# Altium footprint library custom-case.PcbLib: 483 footprints (part 28 of 31)
Each footprint in its own frame and in the unit in brackets; x right, y up, seen from the top. Pads: shape width x height; smd on the part's side, far side on the other; paste and mask are expansions set on the pad; w line width, h text height; cw(c..) or ccw(c..) is an arc to the next point about the centre after c.
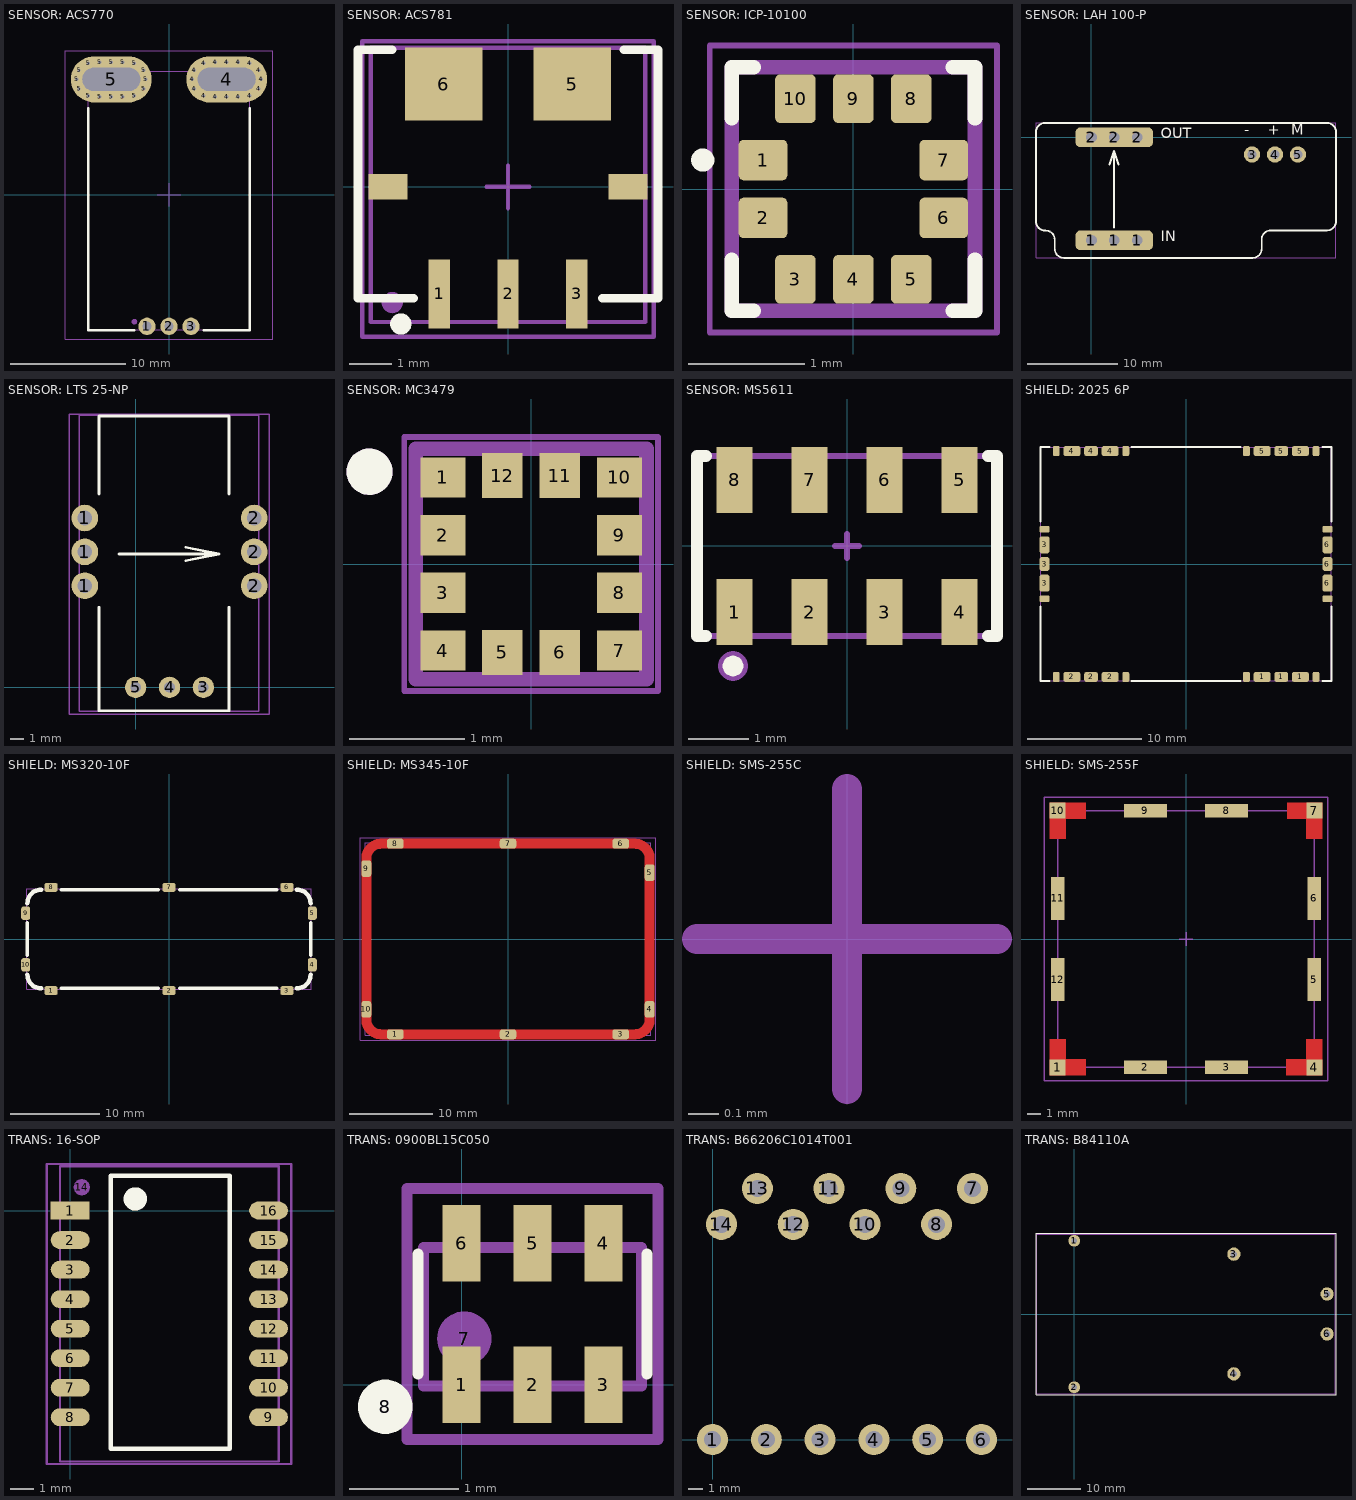
[diagram p27: the footprints below, top view; thin cyan lines are the x and y axes]

## SENSOR: ACS770 [mm]
pads (38):
  round 1.5 hole 0.8: 1(-1.91,-11.4) 2(0,-11.4) 3(1.91,-11.4)
  round 0.5 on Mech1: 4(-3,-11)
  round 0.7 hole 0.3: 4(2,10) 4(2.2,9.2) 4(2.2,10.8) 4(3,8.6) 4(3,11.4) 4(4,8.5) 4(4,11.5) 4(5,8.5) 4(5,11.5) 4(6,8.5) 4(6,11.5) 4(7,8.6) 4(7,11.4) 4(7.8,9.2) 4(7.8,10.8) 4(8,10) 5(-8,10) 5(-7.8,9.2) 5(-7.8,10.8) 5(-7,8.6) 5(-7,11.4) 5(-6,8.5) 5(-6,11.5) 5(-5,8.5) 5(-5,11.5) 5(-4,8.5) 5(-4,11.5) 5(-3,8.6) 5(-3,11.4) 5(-2.2,9.2) 5(-2.2,10.8) 5(-2,10)
  oval 7x4 hole 2 slot 5 at 0 deg: 4(5,10) 5(-5,10)
Top Overlay:
  lines w0.2: -7,7.5 -7,-11.75 -3,-11.75 ; 3,-11.75 7,-11.75 7,7.5
Top Assy:
  lines w0.1: -7,-11.705 -7,10.705 7,10.705 7,-11.705 -7,-11.705
Size Area:
  lines w0.1: -1,0 1,0 ; 0,-1 0,1 ; -9,-12.5 -9,12.5 9,12.5 9,-12.5 ; -9,-12.5 9,-12.5 ; -9,-12.5 9,-12.5
3D body "User Library-ACS758xCB-PFF.STEP": height 7.5, standoff -2.98, extent -7,-11.705 7,10.705

## SENSOR: ACS781 [mm]
pads (9):
  rect 0.5x1.6 smd: 1(-1.6,-2.5) 2(0,-2.5) 3(1.6,-2.5)
  rect 1.8x1.7 smd: 5(1.5,2.4) 6(-1.5,2.4)
  rect 0.9x0.6 smd: ""(-2.8,0) ""(2.8,0)
  round 0.5 on Mech1: ""(-2.7,-2.7)
  round 0.5 on Top Overlay: ""(-2.5,-3.2)
Top Overlay:
  lines w0.2: -2.7,3.2 -3.5,3.2 -3.5,-2.6 -2.2,-2.6 ; 2.2,-2.6 3.5,-2.6 3.5,3.2 2.7,3.2
Top Assy:
  lines w0.1: -3.2,-3.154 3.2,-3.154 3.2,3.246 -3.2,3.246 -3.2,-3.154
Size Area:
  lines w0.1: -0.5,0 0.5,0 ; 0,-0.5 0,0.5 ; -3.4,-3.5 -3.4,3.4 3.4,3.4 3.4,-3.5 -3.4,-3.5
3D body "User Library-7-Pin PSOF Package.STEP": height 1.46, standoff -0.02, extent -3.2,-3.154 3.2,3.246

## SENSOR: ICP-10100 [mm] "2.0 x 2.0 x 0.72 mm"
pads (10):
  rrect25% 0.42x0.35 smd: 1(-0.78,0.25) 2(-0.78,-0.25) 6(0.78,-0.25) 7(0.78,0.25)
  rrect25% 0.35x0.42 smd: 3(-0.5,-0.78) 4(0,-0.78) 5(0.5,-0.78) 8(0.5,0.78) 9(0,0.78) 10(-0.5,0.78)
Top Overlay:
  circle w0.1: c-1.3,0.25 r0.05
  lines w0.127: -1.05,-0.61 -1.05,-1.05 -0.86,-1.05 ; -1.05,0.61 -1.05,1.05 -0.86,1.05 ; 0.86,-1.05 1.05,-1.05 1.05,-0.61 ; 0.86,1.05 1.05,1.05 1.05,0.61
3D model:
  circle w0.1: c-0.75,0.25 r0.05
  lines w0.127: -1.05,-1.05 -1.05,1.05 1.05,1.05 1.05,-1.05 -1.05,-1.05
Size Area:
  lines w0.05: -1.24,-1.24 -1.24,1.24 1.24,1.24 1.24,-1.24 -1.24,-1.24
3D body "ICP-10100--3DModel-STEP-56544.STEP": height 0.8, standoff 0, extent -1,-1 1,1

## SENSOR: LAH 100-P [mm]
pads (9):
  rrect50% 3.5x2.2 hole 1.2 square: 1(0,-11.4) 1(2.54,-11.4) 1(5.08,-11.4) 2(0,0) 2(2.54,0) 2(5.08,0)
  round 1.8 hole 1: 3(17.78,-1.905) 4(20.32,-1.905) 5(22.86,-1.905)
Top Overlay:
  lines w0.2: -6.125,0.595 cw(c-5.125,0.595) -5.125,1.595 26.075,1.595 cw(c26.075,0.595) 27.075,0.595 27.075,-9.302 ; -6.125,0.6 -6.125,-9.325 ccw(c-5.125,-9.325) -5.125,-10.325 -5.05,-10.325 cw(c-5.05,-11.325) -4.05,-11.325 -4.05,-12.345 ccw(c-3.05,-12.345) -3.05,-13.345 17.85,-13.345 ccw(c17.85,-12.345) 18.85,-12.345 18.85,-11.3 cw(c19.85,-11.3) 19.85,-10.3 26.075,-10.3 ccw(c26.075,-9.3) 27.075,-9.3 ; 2,-3 2.5,-1.5 ; 2.5,-10 2.5,-1.5 ; 3,-3 2.5,-1.5
  text "IN" at 7.7,-11.9 h2
  text "OUT" at 7.7,-0.5 h2
  text "-" at 16.9,-0.1 h2
  text "+" at 19.5,-0.1 h2
  text "M" at 22.1,-0.1 h2
Top Assy:
  lines w0.1: -6.125,-13.345 -6.125,1.595 27.075,1.595 27.075,-13.345 -6.125,-13.345
Size Area:
  lines w0.1: -6.125,-13.345 -6.125,1.595 27.075,1.595 27.075,-13.345 -6.125,-13.345
3D body "TransCurrent v4.step": height 20.15, standoff -4.45, extent -6.125,-13.345 27.075,1.595

## SENSOR: LTS 25-NP [mm]
pads (9):
  round 2 hole 1.1: 1(-3.81,7.62) 1(-3.81,10.16) 1(-3.81,12.7) 2(8.89,7.62) 2(8.89,10.16) 2(8.89,12.7)
  round 1.6 hole 0.8: 3(5.08,0) 4(2.54,0) 5(0,0)
Top Overlay:
  lines w0.2: -2.75,6 -2.75,-1.75 7,-1.75 7,6 ; -2.75,14.5 -2.75,20.35 7,20.35 7,14.5 ; -1.25,10 6.25,10 ; 3.75,9.5 6.25,10 ; 3.75,10.5 6.25,10
Top Assy:
  lines w0.1: -4.25,-1.8 -4.25,20.4 9.25,20.4 9.25,-1.8 -4.25,-1.8
Size Area:
  lines w0.1: -5,-2 -5,20.5 10,20.5 10,-2 -5,-2
3D body "User Library-LTS6_NP.STEP": height 24, standoff -3.5, extent -4.25,-1.8 9.25,20.4

## SENSOR: MC3479 [mm] "2.0 x 2.0 x 0.94 mm"
pads (12):
  rect 0.39x0.35 smd: 1(-0.765,0.75) 2(-0.765,0.25) 3(-0.765,-0.25) 4(-0.765,-0.75) 7(0.765,-0.75) 8(0.765,-0.25) 9(0.765,0.25) 10(0.765,0.75)
  rect 0.35x0.39 smd: 5(-0.25,-0.765) 6(0.25,-0.765) 11(0.25,0.765) 12(-0.25,0.765)
Top Overlay:
  circle w0.2: c-1.4,0.8 r0.1
3D model:
  circle w0.2: c-1.4,0.8 r0.1
  lines w0.127: -1,-1 1,-1 1,1 -1,1 -1,-1
Size Area:
  lines w0.05: -1.1,-1.1 1.1,-1.1 1.1,1.1 -1.1,1.1 -1.1,-1.1
3D body "LGA-12 2x2mm.step": height 0.94, standoff 0, extent -1,-1 1,1

## SENSOR: MS5611 [mm] "5.0 x 3.0 x 1.0 mm"
pads (10):
  rect 0.6x1.1 smd: 1(-1.875,-1.1) 2(-0.625,-1.1) 3(0.625,-1.1) 4(1.875,-1.1) 5(1.875,1.1) 6(0.625,1.1) 7(-0.625,1.1) 8(-1.875,1.1)
  round 0.5 on Mech1: ""(-1.9,-2)
  round 0.35 on Top Overlay: ""(-1.9,-2)
Top Overlay:
  lines w0.2: -2.35,-1.5 -2.5,-1.5 -2.5,0 -2.5,1.5 -2.35,1.5 ; 2.35,-1.5 2.5,-1.5 2.5,0 2.5,1.5 2.35,1.5
Top Assy:
  lines w0.1: -2.5,-1.5 2.5,-1.5 2.5,1.5 -2.5,1.5 -2.5,-1.5
Size Area:
  lines w0.1: -0.2,0 0.2,0 ; 0,-0.2 0,0.2 ; -2.5,-1.5 -2.5,1.5 2.5,1.5 2.5,-1.5 -2.5,-1.5
3D body "MS5611-01BA03.stp": height 1.08, standoff 0.06, extent -2.5,-1.5 2.5,1.5

## SHIELD: 2025 6P [mm] "Shield"
pads (30):
  rrect50% 0.6x0.9 smd: 1(5.3,-9.9) 1(11.4,-9.9) 2(-11.375,-9.9) 2(-5.275,-9.9) 4(-11.375,9.9) 4(-5.275,9.9) 5(5.3,9.9) 5(11.4,9.9)
  rrect50% 1.5x0.9 smd: 1(6.675,-9.9) 1(10.025,-9.9) 2(-10,-9.9) 2(-6.65,-9.9) 4(-10,9.9) 4(-6.65,9.9) 5(6.675,9.9) 5(10.025,9.9)
  rrect50% 1.2x0.9 smd: 1(8.35,-9.9) 2(-8.325,-9.9) 4(-8.325,9.9) 5(8.35,9.9)
  rrect50% 0.9x0.6 smd: 3(-12.4,-3.05) 3(-12.4,3.05) 6(12.4,-3.05) 6(12.4,3.05)
  rrect50% 0.9x1.5 smd: 3(-12.4,-1.675) 3(-12.4,1.675) 6(12.4,-1.675) 6(12.4,1.675)
  rrect50% 0.9x1.2 smd: 3(-12.4,0) 6(12.4,0)
Top Overlay:
  lines w0.2: -12.75,-3.75 -12.75,-10.25 -12,-10.25 ; -12.75,3.75 -12.75,10.25 -12,10.25 ; -4.75,-10.25 4.75,-10.25 ; -4.75,10.25 4.75,10.25 ; 12,-10.25 12.75,-10.25 12.75,-3.75 ; 12,10.25 12.75,10.25 12.75,3.75
Top Assy:
  lines w0.1: -12.75,-10.25 12.75,-10.25 12.75,10.25 -12.75,10.25 -12.75,-10.25
3D body "Shield_2025_01.STEP": height -1.65, standoff -4.8, extent -12.827,-10.327 12.828,10.328

## SHIELD: MS320-10F [mm] "Shield"
pads (10):
  rrect50% 1.5x1 smd mask+0.102: 1(-13.25,-5.8) 2(0,-5.8) 3(13.25,-5.8) 6(13.25,5.8) 7(0,5.8) 8(-13.25,5.8)
  rrect50% 1x1.5 smd mask+0.102: 4(16.1,-2.9) 5(16.1,2.9) 9(-16.1,2.9) 10(-16.1,-2.9)
Top Layer:
  lines w0.3: -15.876,-4.269 ccw(c-14.35,-4) -14.619,-5.526 ; -15.876,4.269 cw(c-14.35,4) -14.619,5.526 ; 14.619,-5.526 ccw(c14.35,-4) 15.876,-4.269 ; 14.619,5.526 cw(c14.35,4) 15.876,4.269
Top Overlay:
  lines w0.4: -15.9,-1.8 -15.9,1.8 ; -12.1,-5.55 -1.2,-5.55 ; -12.1,5.55 -1.2,5.55 ; 1.2,-5.55 12.1,-5.55 ; 1.2,5.55 12.1,5.55 ; 15.9,-1.8 15.9,1.8
  lines w0.5: -15.9,-4 ccw(c-14.35,-4) -14.35,-5.55 ; -15.9,4 cw(c-14.35,4) -14.35,5.55 ; 14.35,-5.55 ccw(c14.35,-4) 15.9,-4 ; 14.35,5.55 cw(c14.35,4) 15.9,4
Top Assy:
  lines w0.1: -16,-5.65 -16,5.65 16,5.65 16,-5.65 -16,-5.65
Size Area:
  lines w0.1: -16,-5.65 16,-5.65 16,5.65 -16,5.65 -16,-5.65
3D body "MS320-10F.STEP": height 2.06, standoff 0.06, extent -16,-5.65 16,5.65

## SHIELD: MS345-10F [mm] "Shield"
pads (10):
  rrect50% 2x1.2 smd mask+0.102: 1(-13.6,-11.5) 2(0,-11.5) 3(13.6,-11.5) 6(13.6,11.5) 7(0,11.5) 8(-13.6,11.5)
  rrect50% 1.2x2 smd mask+0.102: 4(17.1,-8.5) 5(17.1,8) 9(-17.1,8.5) 10(-17.1,-8.5)
Top Layer:
  lines w1.2: -17.1,-9.7 ccw(c-15.3,-9.7) -15.3,-11.5 15.3,-11.5 ccw(c15.3,-9.7) 17.1,-9.7 17.1,9.7 ccw(c15.3,9.7) 15.3,11.5 -15.3,11.5 ccw(c-15.3,9.7) -17.1,9.7 -17.1,-9.7
Top Assy:
  lines w0.1: -17.2,-11.6 -17.2,11.6 17.2,11.6 17.2,-11.6 -17.2,-11.6
Size Area:
  lines w0.1: -17.8,-12.2 17.8,-12.2 17.8,12.2 -17.8,12.2 -17.8,-12.2
3D body "ms345-10f-ns.stp": height 3.52, standoff 0.02, extent -17.25,-11.65 17.25,11.65

## SHIELD: SMS-255C [mm] "Shield cover"
Size Area:
  lines w0.1: -0.5,0 0.5,0 ; 0,-0.5 0,0.5
3D body "SMS-255C.STEP": height 10.2, standoff 8.2, extent -9.83,-9.83 9.83,9.83

## SHIELD: SMS-255F [mm] "Shield"
pads (12):
  rect 1.2x1.2 smd mask+0.102: 1(-9.5,-9.5) 4(9.5,-9.5) 7(9.5,9.5) 10(-9.5,9.5)
  rect 3.2x1 smd mask+0.102: 2(-3,-9.5) 3(3,-9.5) 8(3,9.5) 9(-3,9.5)
  rect 1x3.2 smd mask+0.102: 5(9.5,-3) 6(9.5,3) 11(-9.5,3) 12(-9.5,-3)
Top Layer:
  region: -10.1,-10.1 -7.4,-10.1 -7.4,-8.9 -8.9,-8.9 -8.9,-7.4 -10.1,-7.4 -10.1,-8.9
  region: 10.1,-10.1 10.1,-7.4 8.9,-7.4 8.9,-8.9 7.4,-8.9 7.4,-10.1 8.9,-10.1
  region: 10.1,10.1 7.5,10.1 7.5,8.9 8.9,8.9 8.9,7.4 10.1,7.4 10.1,8.9
  region: -10.1,10.1 -10.1,7.4 -8.9,7.4 -8.9,8.9 -7.4,8.9 -7.4,10.1 -8.9,10.1
Top Assy:
  lines w0.1: -9.5,-9.5 -9.5,9.5 9.5,9.5 9.5,-9.5 -9.5,-9.5
Size Area:
  lines w0.1: -0.5,0 0.5,0 ; 0,-0.5 0,0.5 ; -10.5,-10.5 10.5,-10.5 10.5,10.5 -10.5,10.5 -10.5,-10.5
3D body "SMS-255F.STEP": height 5.1, standoff 0.02, extent -9.862,-9.862 9.862,9.862

## TRANS: 16-SOP [mm]
pads (17):
  rect 1.67x0.76 smd: 1(0,0)
  oval 1.67x0.76 smd: 2(0,-1.27) 3(0,-2.54) 4(0,-3.81) 5(0,-5.08) 6(0,-6.35) 7(0,-7.62) 8(0,-8.89) 9(8.53,-8.89) 10(8.53,-7.62) 11(8.53,-6.35) 12(8.53,-5.08) 13(8.53,-3.81) 14(8.53,-2.54) 15(8.53,-1.27) 16(8.53,0)
  round 0.7 on Mech1: 14(0.5,1)
Top Overlay:
  circle w0.6: c2.8,0.5 r0.2
  lines w0.2: 4.583,1.5 6.86,1.5 6.86,-10.25 1.75,-10.25 1.75,1.5 6,1.5
Top Assy:
  lines w0.1: -0.435,-10.795 8.965,-10.795 8.965,1.905 -0.435,1.905 -0.435,-10.795
Size Area:
  lines w0.1: -1,-10.9 -1,2 9.5,2 9.5,-10.9 -1,-10.9
3D body "User Library-smt4.step": height 5.1, standoff 0, extent -0.435,-10.795 8.965,1.905

## TRANS: 0900BL15C050 [mm]
pads (8):
  rect 0.35x0.7 smd: 1(0,0) 2(0.65,0) 3(1.3,0) 4(1.3,1.3) 5(0.65,1.3) 6(0,1.3)
  round 0.5 on Mech1: 7(0.025,0.425)
  round 0.5 on Top Overlay: 8(-0.7,-0.2)
Top Overlay:
  lines w0.1: -0.4,0.1 -0.4,1.2 ; 1.7,0.1 1.7,1.2
Top Assy:
  lines w0.1: -0.35,-0.01 -0.35,1.26 1.65,1.26 1.65,-0.01 -0.35,-0.01
Size Area:
  lines w0.1: -0.5,-0.5 -0.5,1.8 1.8,1.8 1.8,-0.5 -0.5,-0.5
3D body "User Library-1600BL15B100E.STEP": height 0.84, standoff -0.02, extent -0.35,-0.01 1.65,1.26

## TRANS: B66206C1014T001 [mm]
pads (14):
  round 2.2 hole 1.2: 1(0,0) 2(3.81,0) 3(7.62,0) 4(11.43,0) 5(15.24,0) 6(19.05,0) 7(18.415,17.78) 8(15.875,15.24) 9(13.335,17.78) 10(10.795,15.24) 11(8.255,17.78) 12(5.715,15.24) 13(3.175,17.78) 14(0.635,15.24)

## TRANS: B84110A [mm]
pads (6):
  round 2.2 hole 1.1: 1(0,13.75) 2(0,-13.75)
  round 2.5 hole 1.2: 3(30,11.25) 4(30,-11.25) 5(47.5,3.75) 6(47.5,-3.75)
Top Overlay:
  lines w0.2: -7.175,-15.175 49.175,-15.175 49.175,15.175 -7.175,15.175 -7.175,-15.175
Top Assy:
  lines w0.1: 49,15 -7,15 -7,-15 49,-15 49,15 ; 49,15 49,15
Size Area:
  lines w0.1: -7,-15 -7,15 49,15 49,-15 -7,-15
3D body "B84110A.stp": height 23.1, standoff -4, extent -7,-15 49,15